# Altium footprint library TSW-101-07-G-D.PcbLib: 1 footprints
Each footprint in its own frame and in the unit in brackets; x right, y up, seen from the top. Pads: shape width x height; smd on the part's side, far side on the other; paste and mask are expansions set on the pad; w line width, h text height; cw(c..) or ccw(c..) is an arc to the next point about the centre after c.
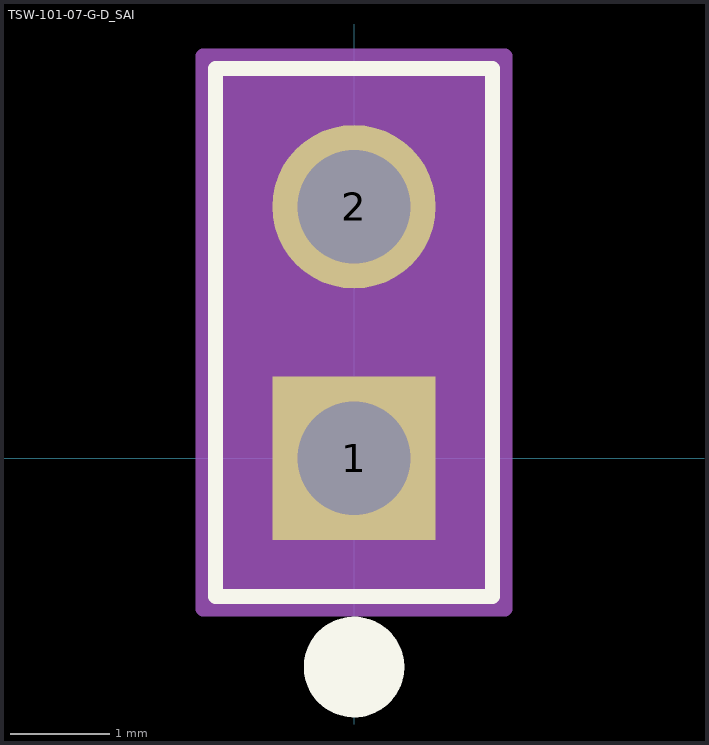
[diagram p0: the footprint, top view; thin cyan lines are the x and y axes]

## TSW-101-07-G-D_SAI [mil]
pads (2):
  rect 65x65 hole 45 paste-32.5 mask+0: 1(0,0)
  round 65 hole 45 paste-32.5 mask+0: 2(0,100)
Top Overlay:
  circle w20: c0,-83 r10
  lines w6: -55,-55 55,-55 55,155 -55,155 -55,-55
  text ".Designator" at -137.5,25 h50
Mechanical 13:
  circle w1: c0,-35 r10
  lines w1: -50,-50 50,-50 50,150 -50,150 -50,-50
  text ".Designator" at -137.5,25 h50
Mechanical 15:
  region: 60,160 -60,160 -60,-60 60,-60
  lines w6: -60,-60 -60,160 60,160 60,-60 -60,-60
3D body "TSW-101-07-G-D_SAI.step": height 330, standoff -200, extent -50,-150 50,50